# Altium integrated library LIB1.IntLib: 106 symbols (part 3 of 3)
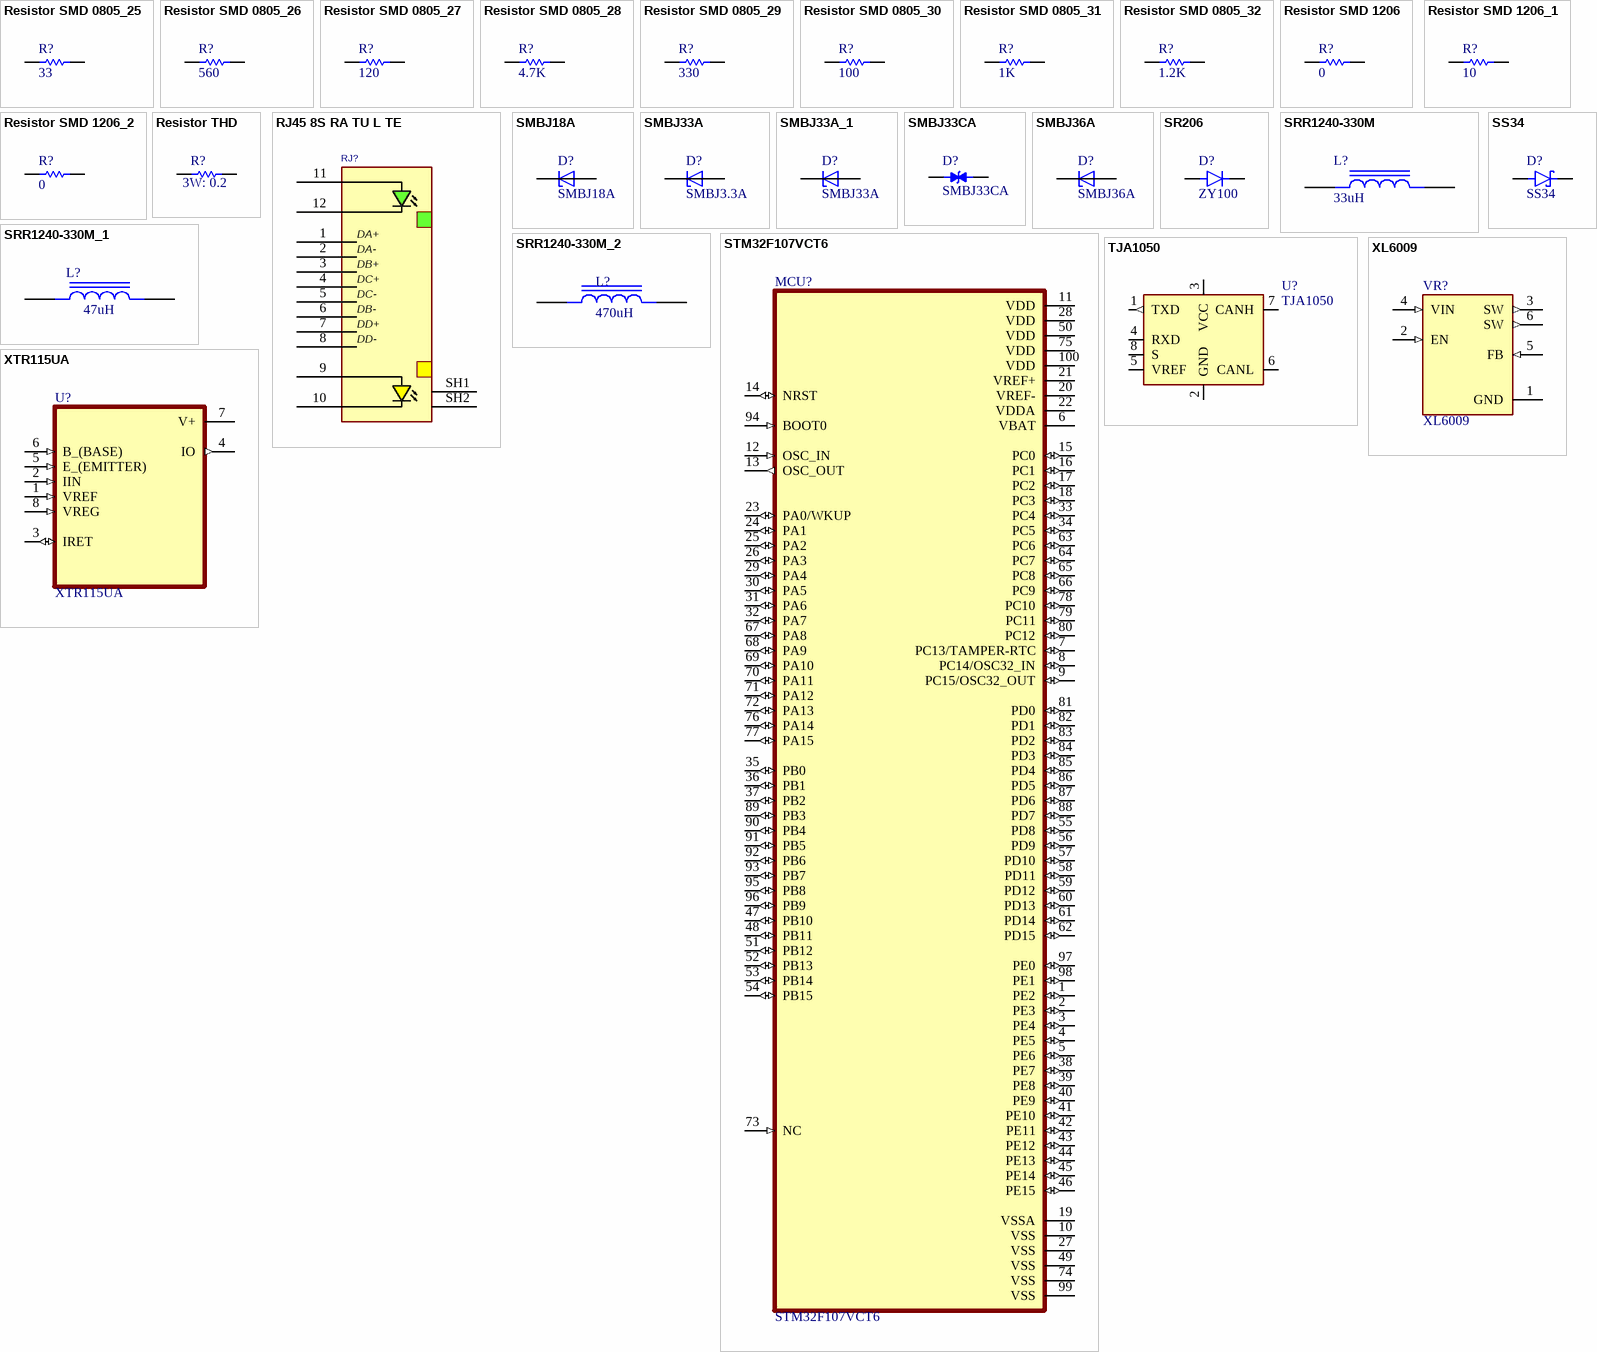
[diagram p4: symbols Resistor SMD 0805_25 to XTR115UA]

## SMBJ18A
designator D?
600W, 21.1V, 5%, Unidirectional, TVS; MF: Taiwan Semiconductor; SnapEDA_Link: https://www.snapeda.com/parts/SMBJ18A/taiwan/view-part/?ref=snap; Package: SMD-2 Taiwan Semiconductor; Value: *; MP: SMBJ18A; Check_prices: https://www.snapeda.com/parts/SMBJ18A/taiwan/view-part/?ref=eda
footprint DIOM4336X265N
pins: A, C

## SMBJ33A
designator D?, comment SMBJ3.3A
600W, 38.7V, 5%, Unidirectional, TVS; MF: Taiwan Semiconductor Corporation; MP: SMBJ33A; SnapEDA_Link: https://www.snapeda.com/parts/SMBJ33A/taiwan/view-part/?ref=snap; Package: SMD-2 Taiwan Semiconductor; Value: *; Check_prices: https://www.snapeda.com/parts/SMBJ33A/taiwan/view-part/?ref=eda
footprint DIOM4336X265N
pins: A, C

## SMBJ33A_1
designator D?, comment SMBJ33A
600W, 38.7V, 5%, Unidirectional, TVS; MF: Taiwan Semiconductor Corporation; SnapEDA_Link: https://www.snapeda.com/parts/SMBJ33A/taiwan/view-part/?ref=snap; Package: SMD-2 Taiwan Semiconductor; Value: *; MP: SMBJ33A; Check_prices: https://www.snapeda.com/parts/SMBJ33A/taiwan/view-part/?ref=eda
footprint DIOM4336X265N
pins: A, C

## SMBJ33CA
designator D?
600W, 38.7V, 5%, Bidirectional, TVS; MF: Taiwan Semiconductor Corporation; SnapEDA_Link: https://www.snapeda.com/parts/SMBJ33CA/taiwan/view-part/?ref=snap; Package: SMB Taiwan Semiconductor; Value: *; MP: SMBJ33CA; Check_prices: https://www.snapeda.com/parts/SMBJ33CA/taiwan/view-part/?ref=eda
footprint DIOM4336X265N
pins: 1, 2

## SMBJ36A
designator D?
58.1V Clamp 10.4A Ipp Tvs Diode Surface Mount DO-214AA (SMBJ); MF: Littelfuse Inc.; SnapEDA_Link: https://www.snapeda.com/parts/SMBJ36A/Littelfuse/view-part/?ref=snap; Package: DO-214AA Littelfuse; Value: *; MP: SMBJ36A; Check_prices: https://www.snapeda.com/parts/SMBJ36A/Littelfuse/view-part/?ref=eda
footprint DIOM4336X265N
pins: A, C

## SR206
designator D?, comment ZY100
MP: SR206; MF: Taiwan Semiconductor Corporation; Purchase-URL: https://pricing.snapeda.com/search/part/SR206/?ref=eda; SnapEDA_Link: https://www.snapeda.com/parts/SR206/Taiwan+Semiconductor/view-part/?ref=snap; Value: *; Package: DO-15 Taiwan Semiconductor; Price: None; Availability: In Stock; Check_prices: https://www.snapeda.com/parts/SR206/Taiwan+Semiconductor/view-part/?ref=eda
footprint DIOAD1300W80L670D310
pins: A, C K

## SRR1240-330M
designator L?, comment 33uH
Inductor,Power, Shielded,Wirewound,33uH,20%,2.3A | Bourns SRR1240-330M; SnapEDA_Link: https://www.snapeda.com/parts/SRR1240-330M/Bourns/view-part/?ref=snap; Package: Non Standard Bourns; Value: *; MF: Bourns; MP: SRR1240-330M; Check_prices: https://www.snapeda.com/parts/SRR1240-330M/Bourns/view-part/?ref=eda
footprint IND_SRR1240-330M
pins: 1, 2

## SRR1240-330M_1
designator L?, comment value 47uH  (hidden comment: SRR1240-330M)
Inductor,Power, Shielded,Wirewound,33uH,20%,2.3A | Bourns SRR1240-330M; SnapEDA_Link: https://www.snapeda.com/parts/SRR1240-330M/Bourns/view-part/?ref=snap; Package: Non Standard Bourns; MF: Bourns; MP: SRR1240-330M; Check_prices: https://www.snapeda.com/parts/SRR1240-330M/Bourns/view-part/?ref=eda
footprint IND_SRR1240-330M
pins: 1, 2

## SRR1240-330M_2
designator L?, comment value 470uH  (hidden comment: SRR1240-330M)
Inductor,Power, Shielded,Wirewound,33uH,20%,2.3A | Bourns SRR1240-330M; SnapEDA_Link: https://www.snapeda.com/parts/SRR1240-330M/Bourns/view-part/?ref=snap; Package: Non Standard Bourns; MF: Bourns; MP: SRR1240-330M; Check_prices: https://www.snapeda.com/parts/SRR1240-330M/Bourns/view-part/?ref=eda
footprint IND_SRR1240-330M
pins: 1, 2

## SS34
designator D?
Diode Schottky 40 V 3A Surface Mount SMC (DO-214AB); MF: onsemi; SnapEDA_Link: https://www.snapeda.com/parts/SS34/Onsemi/view-part/?ref=snap; Package: SMC-2 ON Semiconductor; Value: *; MP: SS34; Check_prices: https://www.snapeda.com/parts/SS34/Onsemi/view-part/?ref=eda
footprint DIOM7959X265N
footprint DIOM4336X265N
pins: A, C K

## STM32F107VCT6
designator MCU?
ARMÂ® CortexÂ®-M3 STM32F1 Microcontroller IC 32-Bit 72MHz 256KB _256K x 8_ FLASH; MF: STMicroelectronics; Package: LQFP-100 STMicroelectronics; Value: *; Price: None; MP: STM32F107VCT6; SnapEDA_Link: https://www.snapeda.com/parts/STM32F107VCT6/STMicroelectronics/view-part/46316/?ref=snap; Availability: Unavailable
footprint QFP50P1600X1600X160-100N
pins: 1 PE2 (io), 2 PE3 (io), 3 PE4 (io), 4 PE5 (io), 5 PE6 (io), 6 VBAT (power), 7 PC13/TAMPER-RTC (io), 8 PC14/OSC32_IN (io), 9 PC15/OSC32_OUT (io), 10 VSS (power), 11 VDD (power), 12 OSC_IN (in), 13 OSC_OUT (out), 14 NRST (io), 15 PC0 (io), 16 PC1 (io), 17 PC2 (io), 18 PC3 (io), 19 VSSA (power), 20 VREF- (power), 21 VREF+ (power), 22 VDDA (power), 23 PA0/WKUP (io), 24 PA1 (io), 25 PA2 (io), 26 PA3 (io), 27 VSS (power), 28 VDD (power), 29 PA4 (io), 30 PA5 (io), 31 PA6 (io), 32 PA7 (io), 33 PC4 (io), 34 PC5 (io), 35 PB0 (io), 36 PB1 (io), 37 PB2 (io), 38 PE7 (io), 39 PE8 (io), 40 PE9 (io), 41 PE10 (io), 42 PE11 (io), 43 PE12 (io), 44 PE13 (io), 45 PE14 (io), 46 PE15 (io), 47 PB10 (io), 48 PB11 (io), 49 VSS (power), 50 VDD (power), 51 PB12 (io), 52 PB13 (io), 53 PB14 (io), 54 PB15 (io), 55 PD8 (io), 56 PD9 (io), 57 PD10 (io), 58 PD11 (io), 59 PD12 (io), 60 PD13 (io), 61 PD14 (io), 62 PD15 (io), 63 PC6 (io), 64 PC7 (io), 65 PC8 (io), 66 PC9 (io), 67 PA8 (io), 68 PA9 (io), 69 PA10 (io), 70 PA11 (io), 71 PA12 (io), 72 PA13 (io), 73 NC (in), 74 VSS (power), 75 VDD (power), 76 PA14 (io), 77 PA15 (io), 78 PC10 (io), 79 PC11 (io), 80 PC12 (io), 81 PD0 (io), 82 PD1 (io), 83 PD2 (io), 84 PD3 (io), 85 PD4 (io), 86 PD5 (io), 87 PD6 (io), 88 PD7 (io), 89 PB3 (io), 90 PB4 (io), 91 PB5 (io), 92 PB6 (io), 93 PB7 (io), 94 BOOT0 (in), 95 PB8 (io), 96 PB9 (io), 97 PE0 (io), 98 PE1 (io), 99 VSS (power), 100 VDD (power)

## TJA1050
designator U?
CAN 1MBd Silent 5V Automotive 8-Pin SO T/R; MF: NXP Semiconductors; SnapEDA_Link: https://www.snapeda.com/parts/TJA1050/NXP+Semiconductors/view-part/?ref=snap; Package: None; Value: *; MP: TJA1050; Check_prices: https://www.snapeda.com/parts/TJA1050/NXP+Semiconductors/view-part/?ref=eda
footprint SOT96-1
pins: 1 TXD (out), 2 GND (io), 3 VCC (io), 4 RXD (io), 5 VREF, 6 CANL (io), 7 CANH (io), 8 S (power)

## XL6009
designator VR?
The XL6009 regulator is a wide input range, current mode, DC/DC converter which is capable of generating either positive or negative output voltages.; MF: XLSEMI; Package: TO-263-5L XLSEMI; Price: None; Value: *; SnapEDA_Link: https://www.snapeda.com/parts/XL6009/XLSEMI/view-part/?ref=snap; MP: XL6009; Availability: Not in stock; Check_prices: https://www.snapeda.com/parts/XL6009/XLSEMI/view-part/?ref=eda
footprint DPAK170P1435X465-6N
pins: 1 GND (power), 2 EN (in), 3 SW (out), 4 VIN (in), 5 FB (in), 6 SW (out)

## XTR115UA
designator U?
Transmisor de bucle de corriente de 4-20 mA con referencia de 2,5 V y potencia de 200 Î¼A; MF: Texas Instruments; SnapEDA_Link: https://www.snapeda.com/parts/XTR115UA/Texas+Instruments/view-part/?ref=snap; Package: SOIC-8 Texas Instruments; Value: *; MP: XTR115UA; Check_prices: https://www.snapeda.com/parts/XTR115UA/Texas+Instruments/view-part/?ref=eda
footprint SOIC127P599X175-8N
pins: 1 VREF (in), 2 IIN (in), 3 IRET (io), 4 IO (out), 5 E_(EMITTER) (in), 6 B_(BASE) (in), 7 V+ (power), 8 VREG (in)